# Altium footprint library Propia.PcbLib: 378 footprints (part 14 of 24)
Each footprint in its own frame and in the unit in brackets; x right, y up, seen from the top. Pads: shape width x height; smd on the part's side, far side on the other; paste and mask are expansions set on the pad; w line width, h text height; cw(c..) or ccw(c..) is an arc to the next point about the centre after c.
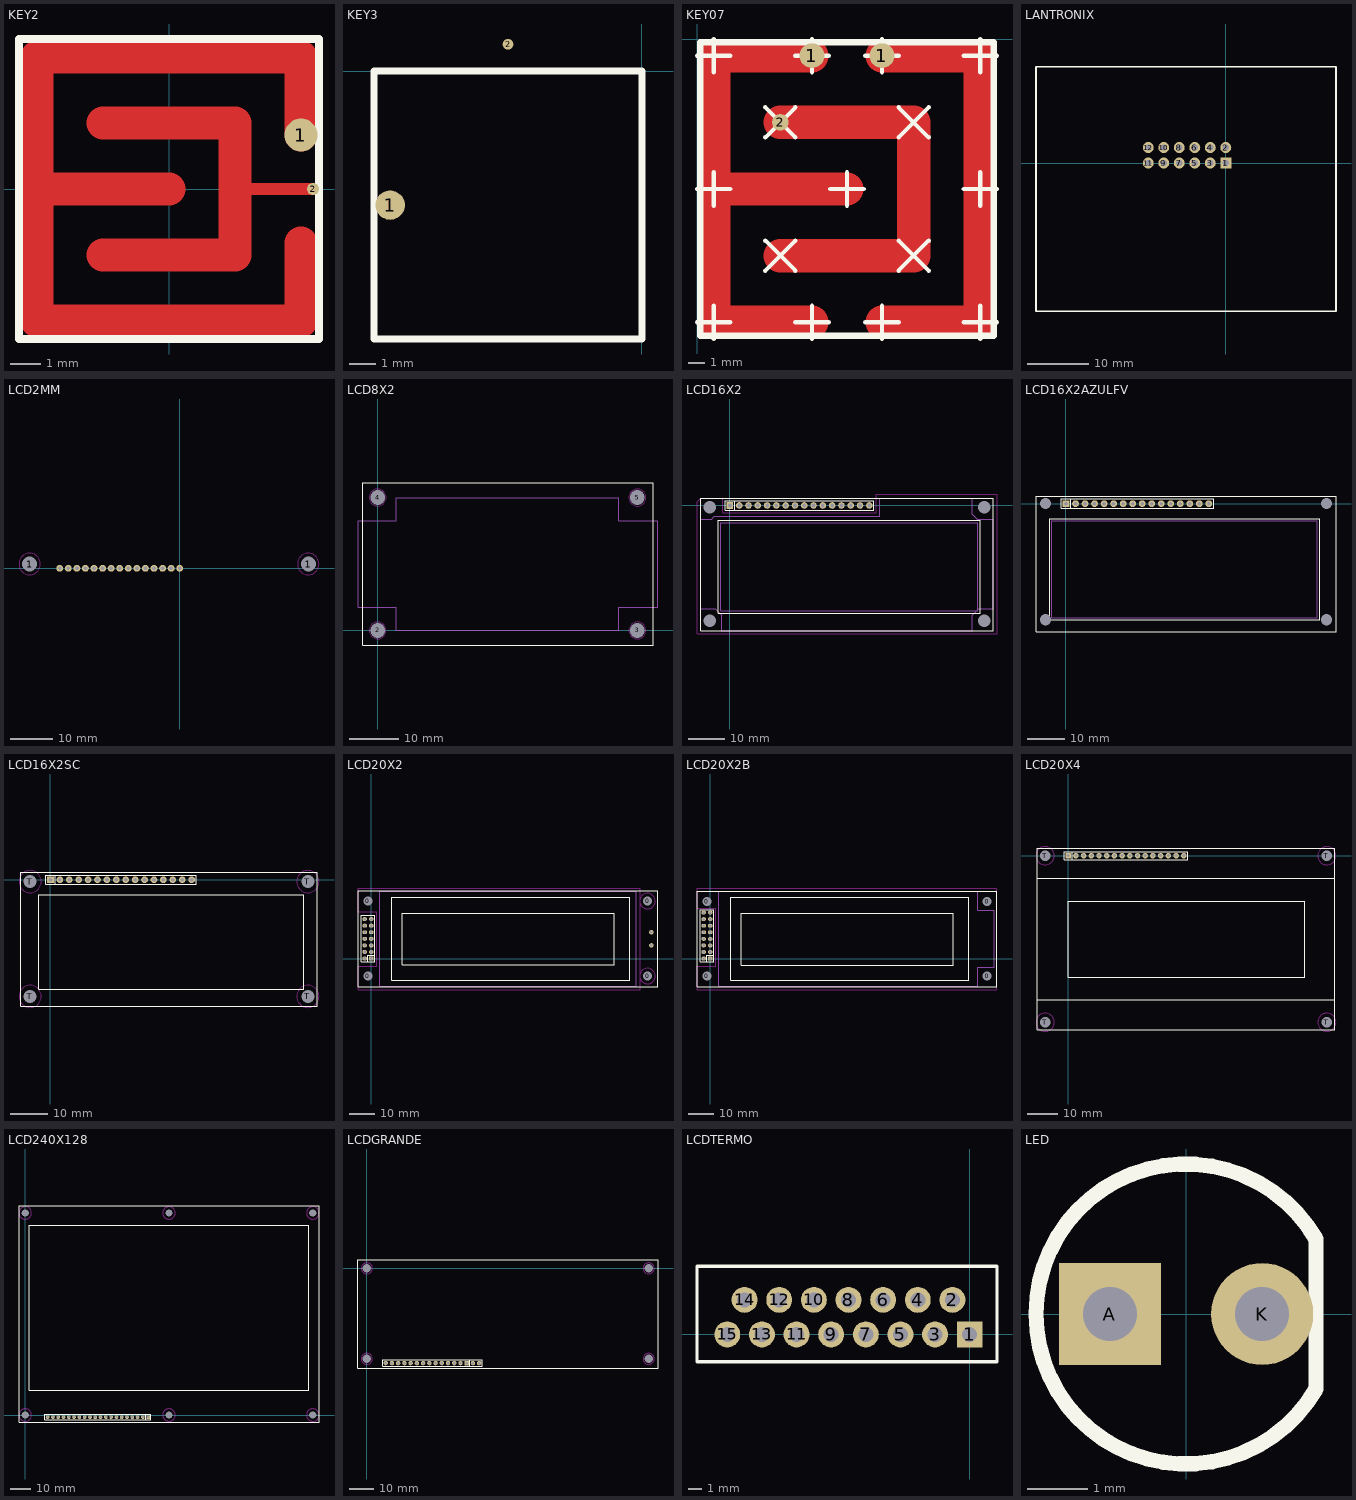
[diagram p13: the footprints below, top view; thin cyan lines are the x and y axes]

## KEY2 [mm]
pads (2):
  round 1.1 smd: 1(4.4,1.8)
  round 0.4 smd: 2(4.8,0)
TopLayer:
  lines w0.4: 2.2,0 4.8,0
  lines w1.1: -4.4,0 0,0 ; -2.2,-2.2 2.2,-2.2 2.2,2.2 -2.2,2.2 ; 4.4,-1.8 4.4,-4.4 -4.4,-4.4 -4.4,4.4 4.4,4.4 4.4,1.8
TopOverlay:
  lines w0.254: -5,-5 -5,5 5,5 5,-5 -5,-5

## KEY3 [mm]
pads (2):
  round 1.1 smd: 1(-9.4,-5)
  round 0.4 smd: 2(-5,1)
TopOverlay:
  lines w0.254: -10,-10 0,-10 0,0 -10,0 -10,-10

## KEY07 [mm]
pads (3):
  round 1.5 smd: 1(6.9,-1) 1(11.1,-1)
  round 1 smd: 2(5,-5)
TopLayer:
  lines w2: 1,-9 9,-9 ; 5,-13 13,-13 13,-5 5,-5 ; 6.9,-17 1,-17 1,-1 6.9,-1 ; 11.1,-17 17,-17 17,-1 11.1,-1
TopOverlay:
  lines w0.254: 0,-17 2,-17 ; 0,-9 2,-9 ; 0,-1 2,-1 ; 1,-18 1,-16 ; 1,-10 1,-8 ; 1,-2 1,0 ; 4.1,-13.9 5,-13 ; 4.1,-12.1 5,-13 ; 4.1,-5.9 5,-5 ; 4.1,-4.1 5,-5 ; 5.9,-17 7.9,-17 ; 5.9,-13.9 5,-13 ; 5.9,-12.1 5,-13 ; 5.9,-5.9 5,-5 ; 5.9,-4.1 5,-5 ; 5.9,-1 7.9,-1 ; 6.9,-18 6.9,-16 ; 6.9,-2 6.9,0 ; 8,-9 10,-9 ; 9,-10 9,-8 ; 10.1,-17 12.1,-17 ; 10.1,-1 12.1,-1 ; 11.1,-18 11.1,-16 ; 11.1,-2 11.1,0 ; 12.1,-13.9 13,-13 ; 12.1,-12.1 13,-13 ; 12.1,-5.9 13,-5 ; 12.1,-4.1 13,-5 ; 13.9,-13.9 13,-13 ; 13.9,-12.1 13,-13 ; 13.9,-5.9 13,-5 ; 13.9,-4.1 13,-5 ; 16,-17 18,-17 ; 16,-9 18,-9 ; 16,-1 18,-1 ; 17,-18 17,-16 ; 17,-10 17,-8 ; 17,-2 17,0
  lines w0.4: 0.2,-17.8 17.8,-17.8 17.8,-0.2 0.2,-0.2 0.2,-17.8

## LANTRONIX [mm]
pads (12):
  rect 1.8x1.8 hole 1: 1(0,0)
  round 1.8 hole 1: 2(0,2.54) 3(-2.54,0) 4(-2.54,2.54) 5(-5.08,0) 6(-5.08,2.54) 7(-7.62,0) 8(-7.62,2.54) 9(-10.16,0) 10(-10.16,2.54) 11(-12.7,0) 12(-12.7,2.54)
TopOverlay:
  lines w0.254: -31.09,-24.257 -31.09,15.748 18.059,15.748 18.059,-24.257 -31.09,-24.257

## LCD2MM [mm]
pads (17):
  round 3 hole 3.5: 1(-35,1) 1(30,1)
  round 1.6 hole 0.9: 1(0,0) 2(-2,0) 3(-4,0) 4(-6,0) 5(-8,0) 6(-10,0) 7(-12,0) 8(-14,0) 9(-16,0) 10(-18,0) 11(-20,0) 12(-22,0) 13(-24,0) 14(-26,0) 15(-28,0)
KeepOutLayer:
  circle w0.254: c-35,1 r2.5
  circle w0.254: c30,1 r2.5

## LCD8X2 [mm]
pads (4):
  round 1.8 hole 3: 2(0,0) 3(52.8,0) 4(0,27) 5(52.8,27)
TopOverlay:
  lines w0.254: -3,-3 56,-3 56,30 -3,30 -3,-3
KeepOutLayer:
  circle w0.254: c0,0 r1.703
  circle w0.254: c52.8,0 r1.712
  circle w0.254: c0,27 r1.712
  circle w0.254: c52.8,27 r1.726
Mechanical1:
  lines w0.254: -4,4.75 3.75,4.75 3.75,0 49.05,0 49.05,4.75 57,4.75 57,22.25 49.05,22.25 49.05,27 3.75,27 3.75,22.25 -4,22.25 -4,4.75

## LCD16X2 [mm]
pads (20):
  rect 1.8x1.8 hole 1: 1(0,0)
  round 1.8 hole 1: 2(2.54,0) 3(5.08,0) 4(7.62,0) 5(10.16,0) 6(12.7,0) 7(15.24,0) 8(17.78,0) 9(20.32,0) 10(22.86,0) 11(25.4,0) 12(27.94,0) 13(30.48,0) 14(33.02,0) 15(35.56,0) 16(38.1,0)
  round 3 hole 3.5: ""(-5.5,-31.5) ""(-5.5,-0.5) ""(69.5,-31.5) ""(69.5,-0.5)
TopOverlay:
  lines w0.254: 1.27,-1.27 1.27,1.27 ; -8,-34.2 -8,2 72,2 72,-34.2 -8,-34.2 ; -3.2,-29.5 68.4,-29.5 68.4,-4 -3.2,-4 -3.2,-29.5 ; -1.27,-1.27 39.37,-1.27 39.37,1.27 -1.27,1.27 -1.27,-1.27
KeepOutLayer:
  lines w0.254: -9,-4.01 -9,-35 73,-35 73,3 40,3 40,2 40,-2 -2,-2 -2,1.97 -2.03,2 -8.01,2 -8.99,1.02 -8.99,-4
Mechanical1:
  lines w0.254: -0.01,-3 41,-3 41,2 66.25,2 ; 0,-3 -4.25,-3 -5,-3.75 -8,-3.75 -8,-28.25 -4,-28.25 -2.25,-30 -2.25,-34.19 -2.26,-34.2 66.25,-34.2 66.25,-30 68,-28.25 72,-28.25 72,-3.75 67.54,-3.75 66.25,-2.46 66.25,1.99 ; -2.5,-28.8 67.7,-28.8 67.7,-4.7 -2.5,-4.7 -2.5,-28.8

## LCD16X2AZULFV [mm]
pads (20):
  rect 1.8x1.8 hole 1: 1(0,0)
  round 1.8 hole 1: 2(2.54,0) 3(5.08,0) 4(7.62,0) 5(10.16,0) 6(12.7,0) 7(15.24,0) 8(17.78,0) 9(20.32,0) 10(22.86,0) 11(25.4,0) 12(27.94,0) 13(30.48,0) 14(33.02,0) 15(35.56,0) 16(38.1,0)
  round 2.5 hole 3: ""(-5.5,-31) ""(-5.5,0) ""(69.5,-31) ""(69.5,0)
TopOverlay:
  lines w0.254: 1.27,-1.27 1.27,1.27 ; -8,-34.2 -8,2 72,2 72,-34.2 -8,-34.2 ; -4.4,-31 -4.4,-4 67.6,-4 67.6,-31 -4.4,-31 ; -1.27,-1.27 39.37,-1.27 39.37,1.27 -1.27,1.27 -1.27,-1.27
Mechanical1:
  lines w0.254: -3.8,-30.4 -3.8,-4.6 67,-4.6 67,-30.4 -3.8,-30.4

## LCD16X2SC [mm]
pads (20):
  rect 1.8x1.8 hole 1: 1(0,0)
  round 1.8 hole 1: 2(2.54,0) 3(5.08,0) 4(7.62,0) 5(10.16,0) 6(12.7,0) 7(15.24,0) 8(17.78,0) 9(20.32,0) 10(22.86,0) 11(25.4,0) 12(27.94,0) 13(30.48,0) 14(33.02,0) 15(35.56,0) 16(38.1,0)
  round 3 hole 3.5: T(-5.5,-31.5) T(-5.5,-0.5) T(69.5,-31.5) T(69.5,-0.5)
TopOverlay:
  lines w0.254: 1.27,-1.27 1.27,1.27 ; -8,-34.2 -8,2 72,2 72,-34.2 -8,-34.2 ; -3.2,-29.5 68.4,-29.5 68.4,-4 -3.2,-4 -3.2,-29.5 ; -1.27,-1.27 39.37,-1.27 39.37,1.27 -1.27,1.27 -1.27,-1.27
KeepOutLayer:
  circle w0.254: c-5.5,-0.5 r3
  circle w0.254: c-5.5,-31.5 r3
  circle w0.254: c69.5,-0.5 r3
  circle w0.254: c69.5,-31.5 r3

## LCD20X2 [mm]
pads (20):
  round 3 hole 3.5: 0(-1.27,-6.8) 0(-1.27,22.2) 0(106.83,-6.8) 0(106.83,22.2)
  rect 1.8x1.5 hole 1: 1(0,0)
  oval 1.8x1.5 hole 1: 2(-2.54,0) 3(0,2.54) 4(-2.54,2.54) 5(0,5.08) 6(-2.54,5.08) 7(0,7.62) 8(-2.54,7.62) 9(0,10.16) 10(-2.54,10.16) 11(0,12.7) 12(-2.54,12.7) 13(0,15.24) 14(-2.54,15.24)
  round 1.7 hole 1: 15(108.3,10.16) 16(108.3,5.08)
TopOverlay:
  lines w0.254: -5.12,-10.88 110.88,-10.88 110.88,26.12 -5.12,26.12 -5.12,-10.88 ; 7.88,-8.38 99.88,-8.38 99.88,23.62 7.88,23.62 7.88,-8.38 ; 12,-2.5 12,17.5 94,17.5 94,-2.5 12,-2.5
  lines w0.305: -1.27,-1.27 -1.27,1.27 1.27,1.27 ; -3.81,-1.27 1.27,-1.27 1.27,16.65 -3.81,16.65 -3.81,-1.27
KeepOutLayer:
  circle w0.254: c106.83,22.2 r3
  circle w0.254: c106.83,-6.8 r3
  lines w0.254: -5.1,-12 104,-12 104,27.1 -5,27.1 -5,18 2.2,18 2.2,-3 -5.1,-3 -5.1,-12
Mechanical1:
  lines w0.254: 3.2,-10.8 3.2,26.1 102.5,26.1 102.5,-10.8 3.2,-10.8

## LCD20X2B [mm]
pads (20):
  round 3 hole 3.5: 0(-1.27,-6.8) 0(-1.27,22.04) 0(107.03,-6.8) 0(107.03,22.04)
  rect 1.8x1.5 hole 1: 1(0,0)
  oval 1.8x1.5 hole 1: 2(-2.54,0) 3(0,2.54) 4(-2.54,2.54) 5(0,5.08) 6(-2.54,5.08) 7(0,7.62) 8(-2.54,7.62) 9(0,10.16) 10(-2.54,10.16) 11(0,12.7) 12(-2.54,12.7) 13(0,15.24) 14(-2.54,15.24) 15(0,17.78) 16(-2.54,17.78)
TopOverlay:
  lines w0.254: -5.12,-10.88 110.88,-10.88 110.88,26.12 -5.12,26.12 -5.12,-10.88 ; 7.88,-8.38 7.88,23.62 99.88,23.62 99.88,-8.38 7.88,-8.38 ; 12,-2.5 12,17.5 94,17.5 94,-2.5 12,-2.5
  lines w0.305: -1.27,-1.27 -1.27,1.27 1.27,1.27 ; -3.81,-1.27 1.27,-1.27 1.27,18.95 -3.81,18.95 -3.81,-1.27
KeepOutLayer:
  lines w0.254: 2.2,17.9 2.2,19.5 -5,19.5 -5,27.1 103.98,27.12 110.88,27.12 110.88,-11.88 110.76,-12 104,-12 -5.1,-12 -5.1,-3 2.2,-3 2.2,18
Mechanical1:
  lines w0.254: 3.2,-10.8 3.2,26.1 103.4,26.1 103.4,18.62 109.88,18.62 109.88,-3.38 103.4,-3.38 103.4,-10.8 3.2,-10.8

## LCD20X4 [mm]
pads (20):
  rect 1.8x1.8 hole 1: 1(0,0)
  round 1.8 hole 1: 2(2.54,0) 3(5.08,0) 4(7.62,0) 5(10.16,0) 6(12.7,0) 7(15.24,0) 8(17.78,0) 9(20.32,0) 10(22.86,0) 11(25.4,0) 12(27.94,0) 13(30.48,0) 14(33.02,0) 15(35.56,0) 16(38.1,0)
  round 3 hole 3.5: T(-7.62,-54.92) T(-7.62,0) T(85.3,-54.92) T(85.3,0)
TopOverlay:
  lines w0.254: -10.16,-47.46 87.83,-47.46 ; -10.16,-7.46 87.84,-7.46 ; 1.27,-1.27 1.27,1.27 ; -10.16,-57.46 -10.16,2.54 49.84,2.54 87.84,2.54 87.84,-57.46 -10.16,-57.46 ; -1.27,-1.27 -1.27,1.27 39.37,1.27 39.37,-1.27 -1.27,-1.27 ; 0,-40 78,-40 78,-15 0,-15 0,-40
KeepOutLayer:
  circle w0.254: c85.3,-54.92 r3
  circle w0.254: c85.3,0 r3
  circle w0.254: c-7.62,-54.92 r3
  circle w0.254: c-7.62,0 r3

## LCD240X128 [mm]
pads (26):
  round 3 hole 3.5: 0(0,0) 0(0,97) 0(69,0) 0(69,97) 0(138,0) 0(138,97)
  rect 1.8x1.8 hole 1: 1(59,-1)
  round 1.8 hole 1: 2(56.46,-1) 3(53.92,-1) 4(51.38,-1) 5(48.84,-1) 6(46.3,-1) 7(43.76,-1) 8(41.22,-1) 9(38.68,-1) 10(36.14,-1) 11(33.6,-1) 12(31.06,-1) 13(28.52,-1) 14(25.98,-1) 15(23.44,-1) 16(20.9,-1) 17(18.36,-1) 18(15.82,-1) 19(13.28,-1) 20(10.74,-1)
TopOverlay:
  lines w0.254: 57.73,-2.27 57.73,0.27 ; -3,-3.5 -3,100.5 141,100.5 141,-3.5 -3,-3.5 ; 2,11.8 136,11.8 136,91.2 2,91.2 2,11.8 ; 9.47,-2.27 60.27,-2.27 60.27,0.27 9.47,0.27 9.47,-2.27
KeepOutLayer:
  circle w0.254: c69,97 r3
  circle w0.254: c69,0 r3
  circle w0.254: c138,97 r3
  circle w0.254: c0,97 r3
  circle w0.254: c138,0 r3
  circle w0.254: c0,0 r3

## LCDGRANDE [mm]
pads (20):
  rect 1.8x1.8 hole 1: 1(40.72,-38.6)
  round 1.8 hole 1: 2(38.18,-38.6) 3(35.64,-38.6) 4(33.1,-38.6) 5(30.56,-38.6) 6(28.02,-38.6) 7(25.48,-38.6) 8(22.94,-38.6) 9(20.4,-38.6) 10(17.86,-38.6) 11(15.32,-38.6) 12(12.78,-38.6) 13(10.24,-38.6) 14(7.7,-38.6) 15(43.26,-38.6) 16(45.8,-38.6)
  round 1.8 hole 3.5: ""(0,-36.9) ""(0,0) ""(114.9,-36.9) ""(114.9,0)
TopOverlay:
  lines w0.254: 42,-39.87 42,-37.33 ; -3.6,-40.7 118.7,-40.7 118.7,3.5 -3.6,3.5 -3.6,-40.7 ; 6.43,-39.87 47.07,-39.87 47.07,-37.33 6.43,-37.33 6.43,-39.87
KeepOutLayer:
  circle w0.254: c114.9,-36.9 r2.25
  circle w0.254: c114.9,0 r2.25
  circle w0.254: c0,-36.9 r2.25
  circle w0.254: c0,0 r2.25

## LCDTERMO [mm]
pads (15):
  rect 1.9x1.9 hole 1.1: 1(0,0)
  round 1.9 hole 1.1: 2(-1.27,2.54) 3(-2.54,0) 4(-3.81,2.54) 5(-5.08,0) 6(-6.35,2.54) 7(-7.62,0) 8(-8.89,2.54) 9(-10.16,0) 10(-11.43,2.54) 11(-12.7,0) 12(-13.97,2.54) 13(-15.24,0) 14(-16.51,2.54) 15(-17.78,0)
TopOverlay:
  lines w0.254: -20,-2 2,-2 2,5 -20,5 -20,-2

## LED [mm]
pads (2):
  rect 1.7x1.7 hole 0.9: A(-1.27,0)
  round 1.7 hole 0.9: K(1.27,0)
TopOverlay:
  lines w0.254: 2.165,-1.25 cw(c0,0) 2.165,1.25 2.165,-1.25